# Altium footprint library MotorDriver_PcbLib.PcbLib: 6 footprints
Each footprint in its own frame and in the unit in brackets; x right, y up, seen from the top. Pads: shape width x height; smd on the part's side, far side on the other; paste and mask are expansions set on the pad; w line width, h text height; cw(c..) or ccw(c..) is an arc to the next point about the centre after c.
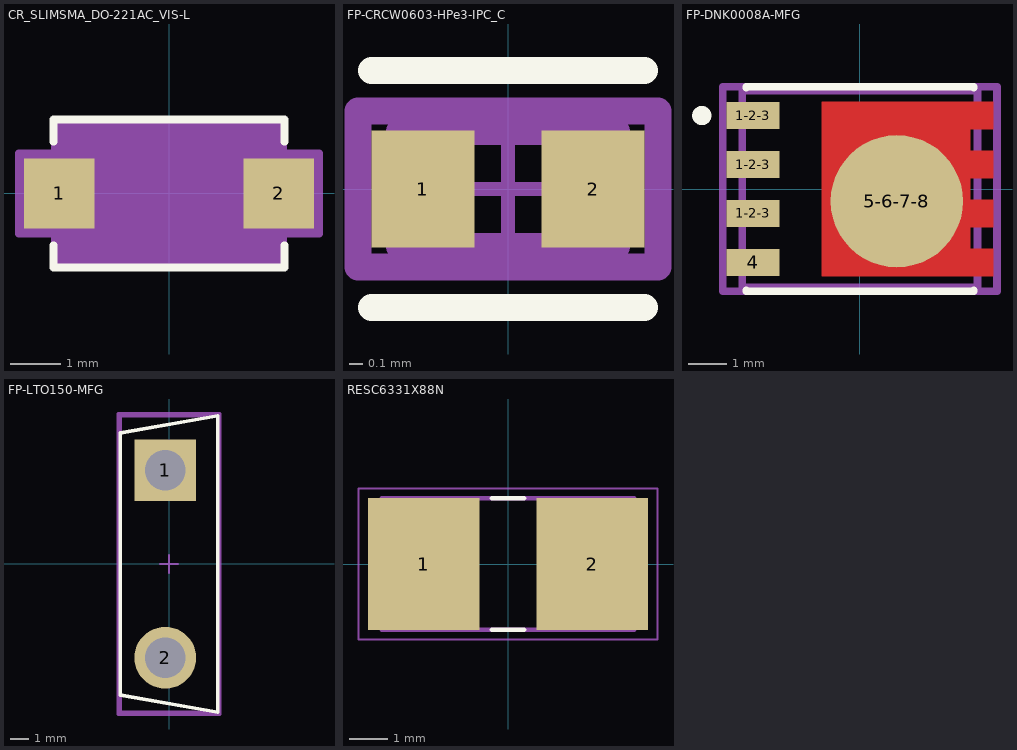
[diagram p0: the footprints below, top view; thin cyan lines are the x and y axes]

## CR_SLIMSMA_DO-221AC_VIS-L [mil]
pads (2):
  rect 55x55 smd paste+0 mask+0: 1(-86,0) 2(86,0)
Top Overlay:
  lines w6: -90.5,-40.6 -90.5,-58 90.5,-58 90.5,-40.6 ; -90.5,40.6 -90.5,58 90.5,58 90.5,40.6
Top 3D Body:
  circle w0: c-58.5,0 r3
  lines w0: -12,53 ccw(c0,53) 12,53
  lines w1: -85.5,-53 -85.5,53 85.5,53 85.5,-53 -85.5,-53
Top Courtyard:
  region: -89.5,-31.5 -117.5,-31.5 -117.5,31.5 -89.5,31.5 -89.5,57 89.5,57 89.5,31.5 117.5,31.5 117.5,-31.5 89.5,-31.5 89.5,-57 -89.5,-57
  lines w6: -117.5,-31.5 -89.5,-31.5 -89.5,-57 89.5,-57 89.5,-31.5 117.5,-31.5 117.5,31.5 89.5,31.5 89.5,57 -89.5,57 -89.5,31.5 -117.5,31.5 -117.5,-31.5
3D body "CR_SLIMSMA_DO-221AC_VIS.step": height 39.09, standoff 0, extent -105.51,-52.99 105.51,52.99

## FP-CRCW0603-HPe3-IPC_C [mil]
pads (2):
  rect 29.85x33.94 smd paste+0 mask+0: 1(-24.68,0) 2(24.68,0)
Top Overlay:
  lines w7.87: -39.61,-34.45 39.61,-34.45 ; -39.61,34.45 39.61,34.45
Top Assembly:
  lines w7.87: -43.55,-22.64 -43.55,22.64 43.55,22.64 43.55,-22.64 -43.55,-22.64
  text ".Designator" at 0,7.4 h39.37
Top 3D Body:
  lines w7.87: -31.5,-16.73 -31.5,16.73 31.5,16.73 31.5,-16.73 -31.5,-16.73
Top Courtyard:
  lines w7.87: -43.55,-22.64 -43.55,22.64 43.55,22.64 43.55,-22.64 -43.55,-22.64
Top Component Center:
  lines w3.94: -19.68,0 19.68,0 ; 0,-19.68 0,19.68
3D body "Res_Vishay_CRCW06031K00FKEAHP_eec.STEP": height 10, standoff 0, extent -43.55,-22.64 43.55,22.64

## FP-DNK0008A-MFG [mm]
pads (5):
  rect 1.372x0.71 smd paste-1000 mask+0: 1-2-3(-2.77,-0.635) 1-2-3(-2.77,0.635) 1-2-3(-2.77,1.905) 4(-2.77,-1.905)
  round 3.434 smd paste-1000 mask+0: 5-6-7-8(0.958,-0.318)
Top Layer:
  region: -0.984,-2.26 3.456,-2.26 3.456,-1.55 2.866,-1.55 2.866,-0.99 3.456,-0.99 3.456,-0.28 2.866,-0.28 2.866,0.28 3.456,0.28 3.456,0.99 2.866,0.99 2.866,1.55 3.456,1.55 3.456,2.26 -0.984,2.26
Top Overlay:
  circle w0.25: c-4.1,1.905 r0.125
  lines w0.2: -2.95,-2.635 -2.95,-2.65 2.95,-2.65 2.95,-2.635 ; -2.95,2.635 -2.95,2.65 2.95,2.65 2.95,2.635
Top Paste:
  rectangle: -3.293,1.624 -2.221,2.186
  rectangle: -3.293,0.354 -2.221,0.916
  rectangle: -3.293,-0.916 -2.221,-0.354
  rectangle: -3.293,-2.186 -2.221,-1.624
  rectangle: 2.527,1.651 3.293,2.159
  rectangle: 2.527,0.381 3.293,0.889
  rectangle: 2.527,-0.889 3.293,-0.381
  rectangle: 2.527,-2.159 3.293,-1.651
  rectangle: 0.947,1.196 2.241,1.942
  rectangle: 0.947,0.15 2.241,0.896
  rectangle: 0.947,-0.896 2.241,-0.15
  rectangle: 0.947,-1.942 2.241,-1.196
  rectangle: -0.697,1.196 0.597,1.942
  rectangle: -0.697,0.15 0.597,0.896
  rectangle: -0.697,-0.896 0.597,-0.15
  rectangle: -0.697,-1.942 0.597,-1.196
Top Assembly:
  lines w0.2: -3.556,-2.65 3.556,-2.65 3.556,2.65 -3.556,2.65 -3.556,-2.65
  text ".Designator" at 0,0 h1
Top 3D Body:
  lines w0.2: -3.05,-2.55 3.05,-2.55 3.05,2.55 -3.05,2.55 -3.05,-2.55
Top Courtyard:
  lines w0.2: -3.556,-2.65 3.556,-2.65 3.556,2.65 -3.556,2.65 -3.556,-2.65
Top Component Center:
  lines w0.1: -0.5,0 0.5,0 ; 0,-0.5 0,0.5
3D body "Trans_Texas_Instruments_CSD19532Q5B_eec.STEP": height 0.25, standoff 0, extent -3.556,-2.65 3.556,2.65

## FP-LTO150-MFG [mm]
pads (2):
  rect 3.35x3.35 hole 2.2 paste-2539.97 mask+0: 1(-0.2,5.08)
  round 3.35 hole 2.2 paste-2539.97 mask+0: 2(-0.2,-5.08)
Top Overlay:
  lines w0.2: -2.65,-7.1 -2.65,7.1 2.65,8.03 2.65,-8.03 -2.65,-7.1
Top Assembly:
  lines w0.2: -2.75,-8.13 2.75,-8.13 2.75,8.13 -2.75,8.13 -2.75,-8.13
  text ".Designator" at 0,0 h1
Top 3D Body:
  lines w0.2: -2.65,-8.03 2.65,-8.03 2.65,8.03 -2.65,8.03 -2.65,-8.03
Top Courtyard:
  lines w0.2: -2.75,-8.13 2.75,-8.13 2.75,8.13 -2.75,8.13 -2.75,-8.13
Top Component Center:
  lines w0.1: -0.5,0 0.5,0 ; 0,-0.5 0,0.5
3D body "Res_Vishay_LTO150F1R000JTE3_eec.STEP": height 0.25, standoff 0, extent -2.75,-8.13 2.75,8.13

## PCBComponent_1 [mil]

## RESC6331X88N [mm]
pads (2):
  rect 2.91x3.44 smd: 1(-2.201,0) 2(2.201,0)
Top Overlay:
  lines w0.127: -0.42,-1.72 0.42,-1.72 ; -0.42,1.72 0.42,1.72
Top 3D Body:
  lines w0.127: -3.3,-1.72 3.3,-1.72 3.3,1.72 -3.3,1.72 -3.3,-1.72
Top Courtyard:
  lines w0.05: -3.906,-1.971 3.906,-1.971 3.906,1.971 -3.906,1.971 -3.906,-1.971